# Altium footprint library IC.PcbLib: 204 footprints (part 12 of 13)
Each footprint in its own frame and in the unit in brackets; x right, y up, seen from the top. Pads: shape width x height; smd on the part's side, far side on the other; paste and mask are expansions set on the pad; w line width, h text height; cw(c..) or ccw(c..) is an arc to the next point about the centre after c.
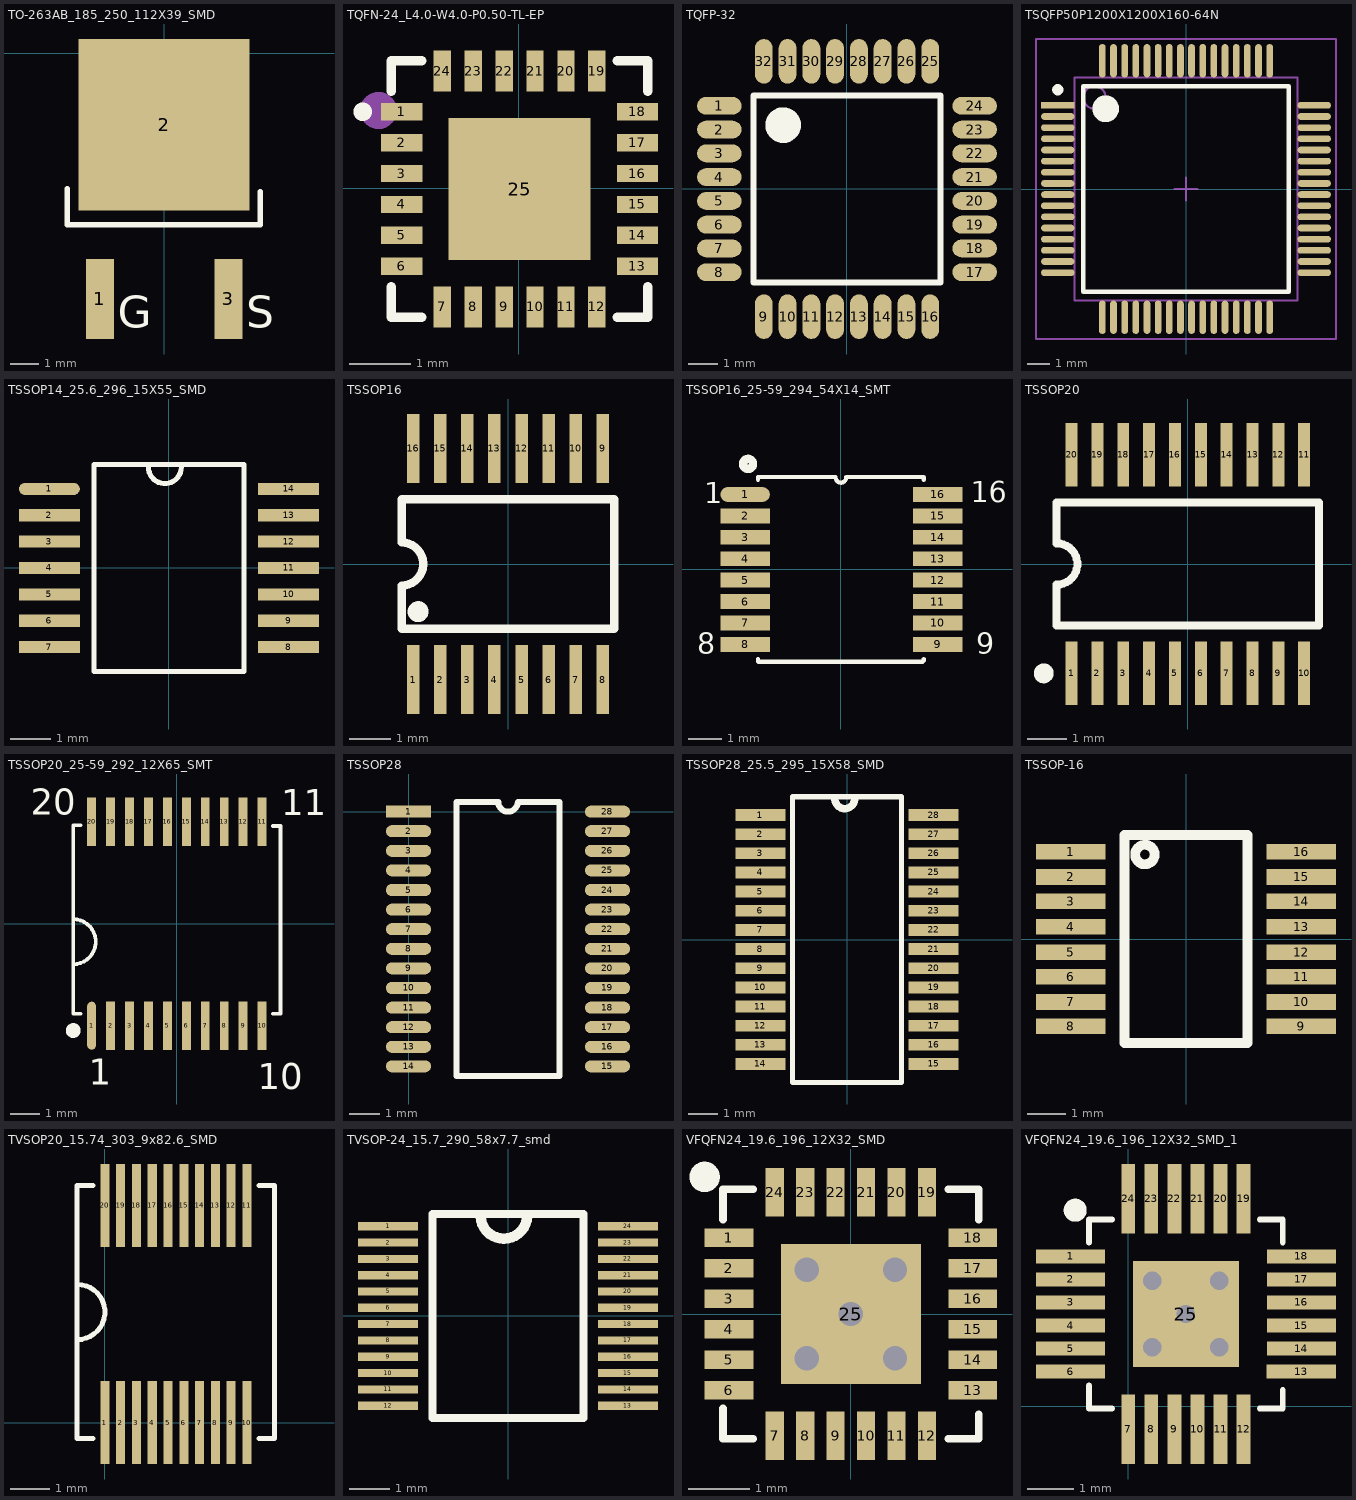
[diagram p11: the footprints below, top view; thin cyan lines are the x and y axes]

## TO-263AB_185_250_112X39_SMD [mm] "CASE: TO-263"
height 4.6
pads (3):
  rect 1x2.85 smd: 1(-2.29,-8.75) 3(2.29,-8.75)
  rect 6.096x6.1 smd: 2(0,-2.54)
Top Overlay:
  lines w0.2: -3.454,-4.826 -3.454,-6.1 3.429,-6.1 3.429,-4.928
  text "G" at -1.651,-9.779 h1.14
  text "S" at 2.921,-9.779 h1.14
3D body "User Library-TO252AA.step": height 2.3, standoff -0.01, extent -3.302,-9.295 3.278,0.405

## TQFN-24_L4.0-W4.0-P0.50-TL-EP [mm]
pads (25):
  rect 0.665x0.28 smd: 1(-1.895,1.236) 2(-1.895,0.736) 3(-1.895,0.236) 4(-1.895,-0.264) 5(-1.895,-0.764) 6(-1.895,-1.264) 13(1.92,-1.264) 14(1.92,-0.764) 15(1.92,-0.264) 16(1.92,0.236) 17(1.92,0.736) 18(1.92,1.236)
  rect 0.28x0.665 smd: 7(-1.238,-1.922) 8(-0.738,-1.922) 9(-0.238,-1.922) 10(0.262,-1.922) 11(0.762,-1.922) 12(1.262,-1.922) 19(1.262,1.893) 20(0.762,1.893) 21(0.262,1.893) 22(-0.238,1.893) 23(-0.738,1.893) 24(-1.238,1.893)
  rect 2.3x2.3 smd: 25(0.012,-0.014)
Top Overlay:
  circle w0.15: c-2.528,1.236 r0.075
  lines w0.152: -2.064,-1.595 -2.064,-2.09 -1.568,-2.09 ; -2.064,1.566 -2.064,2.062 -1.568,2.062 ; 1.593,-2.09 2.088,-2.09 2.088,-1.595 ; 1.593,2.062 2.088,2.062 2.088,1.566
Mechanical 15:
  circle w0.3: c-2.274,1.256 r0.15
3D body "User Library-QFN24_4x4-1.STEP": height 0.75, standoff 0, extent -1.976,-2.021 2.026,1.981

## TQFP-32 [mm] "TQFP, 32-Leads, Body 7.10x7.10mm, Pitch 0.80mm, IPC Medium Density"
height 1.2
pads (32):
  oval 1.5x0.6 smd mask+0.076: 1(-4.3,2.8) 2(-4.3,2) 3(-4.3,1.2) 4(-4.3,0.4) 5(-4.3,-0.4) 6(-4.3,-1.2) 7(-4.3,-2) 8(-4.3,-2.8) 17(4.3,-2.8) 18(4.3,-2) 19(4.3,-1.2) 20(4.3,-0.4) 21(4.3,0.4) 22(4.3,1.2) 23(4.3,2) 24(4.3,2.8)
  oval 0.6x1.5 smd mask+0.076: 9(-2.8,-4.3) 10(-2,-4.3) 11(-1.2,-4.3) 12(-0.4,-4.3) 13(0.4,-4.3) 14(1.2,-4.3) 15(2,-4.3) 16(2.8,-4.3) 25(2.8,4.3) 26(2,4.3) 27(1.2,4.3) 28(0.4,4.3) 29(-0.4,4.3) 30(-1.2,4.3) 31(-2,4.3) 32(-2.8,4.3)
Top Overlay:
  circle w0.6: c-2.15,2.15 r0.3
  lines w0.2: -3.15,-3.15 3.15,-3.15 3.15,3.15 -3.15,3.15 -3.15,-3.15
3D body "TQFP80P925X925X120-32N.step": height 1.2, standoff 0, extent -4.625,-4.625 4.625,4.625

## TSQFP50P1200X1200X160-64N [mm] "TSQFP, 64-Leads, Body 10.00x10.00mm, Pitch 0.50mm, IPC Medium Density"
height 1.6
pads (64):
  rect 1.5x0.3 smd: 1(-5.75,3.75)
  oval 1.5x0.3 smd: 2(-5.75,3.25) 3(-5.75,2.75) 4(-5.75,2.25) 5(-5.75,1.75) 6(-5.75,1.25) 7(-5.75,0.75) 8(-5.75,0.25) 9(-5.75,-0.25) 10(-5.75,-0.75) 11(-5.75,-1.25) 12(-5.75,-1.75) 13(-5.75,-2.25) 14(-5.75,-2.75) 15(-5.75,-3.25) 16(-5.75,-3.75) 33(5.75,-3.75) 34(5.75,-3.25) 35(5.75,-2.75) 36(5.75,-2.25) 37(5.75,-1.75) 38(5.75,-1.25) 39(5.75,-0.75) 40(5.75,-0.25) 41(5.75,0.25) 42(5.75,0.75) 43(5.75,1.25) 44(5.75,1.75) 45(5.75,2.25) 46(5.75,2.75) 47(5.75,3.25) 48(5.75,3.75)
  oval 0.3x1.5 smd: 17(-3.75,-5.75) 18(-3.25,-5.75) 19(-2.75,-5.75) 20(-2.25,-5.75) 21(-1.75,-5.75) 22(-1.25,-5.75) 23(-0.75,-5.75) 24(-0.25,-5.75) 25(0.25,-5.75) 26(0.75,-5.75) 27(1.25,-5.75) 28(1.75,-5.75) 29(2.25,-5.75) 30(2.75,-5.75) 31(3.25,-5.75) 32(3.75,-5.75) 49(3.75,5.75) 50(3.25,5.75) 51(2.75,5.75) 52(2.25,5.75) 53(1.75,5.75) 54(1.25,5.75) 55(0.75,5.75) 56(0.25,5.75) 57(-0.25,5.75) 58(-0.75,5.75) 59(-1.25,5.75) 60(-1.75,5.75) 61(-2.25,5.75) 62(-2.75,5.75) 63(-3.25,5.75) 64(-3.75,5.75)
Top Overlay:
  circle w0.25: c-5.75,4.45 r0.125
  circle w0.6: c-3.6,3.6 r0.3
  lines w0.2: -4.6,-4.6 -4.6,4.6 4.6,4.6 4.6,-4.6 -4.6,-4.6
Top Assembly:
  circle w0.1: c-4.1,4.1 r0.5
  lines w0.1: -5,-5 -5,5 5,5 5,-5 -5,-5
Mechanical 15:
  lines w0.1: -0.5,0 0.5,0 ; 0,-0.5 0,0.5 ; -6.725,-6.725 -6.725,6.725 6.725,6.725 6.725,-6.725 -6.725,-6.725
3D body "TSQFP50P1200X1200X160-64N.step": height 1.6, standoff 0, extent -6,-6 6,6

## TSSOP14_25.6_296_15X55_SMD [mm] "CASE: TSSOP"
height 2
pads (14):
  oval 1.5x0.3 smd: 1(-2.95,1.95)
  rect 1.5x0.3 smd: 2(-2.95,1.3) 3(-2.95,0.65) 4(-2.95,0) 5(-2.95,-0.65) 6(-2.95,-1.3) 7(-2.95,-1.95) 8(2.95,-1.95) 9(2.95,-1.3) 10(2.95,-0.65) 11(2.95,0) 12(2.95,0.65) 13(2.95,1.3) 14(2.95,1.95)
Top Overlay:
  lines w0.127: -0.509,2.489 ccw(c-0.102,2.489) 0.306,2.489 ; -1.85,-2.55 -1.85,2.55 1.85,2.55 1.85,-2.55 -1.85,-2.55
3D body "TSSOP-14.STEP": height 1.2, standoff 0, extent -3.2,-2.5 3.2,2.5

## TSSOP16 [mm] "Shrink Small Outline; 16 Leads; Body Width 4.4 mm; Pitch 0.65 mm"
height 1.1
pads (16):
  rect 0.3x1.65 smd: 1(-2.275,-2.775) 2(-1.625,-2.775) 3(-0.975,-2.775) 4(-0.325,-2.775) 5(0.325,-2.775) 6(0.975,-2.775) 7(1.625,-2.775) 8(2.275,-2.775) 9(2.275,2.775) 10(1.625,2.775) 11(0.975,2.775) 12(0.325,2.775) 13(-0.325,2.775) 14(-0.975,2.775) 15(-1.625,2.775) 16(-2.275,2.775)
Top Overlay:
  circle w0.25: c-2.157,-1.143 r0.125
  lines w0.2: -2.55,-1.55 -2.55,-0.517 ccw(c-2.55,0) -2.55,0.517 -2.55,1.55 2.55,1.55 2.55,-1.55 -2.55,-1.55

## TSSOP16_25-59_294_54X14_SMT [mm] "TSOP, 16-Leads, Body 5.00x4.40mm, Pitch 0.65mm"
height 1.2
pads (16):
  oval 1.5x0.45 smd mask+0.076: 1(-2.908,2.273)
  rect 1.5x0.45 smd mask+0.076: 2(-2.908,1.623) 3(-2.908,0.973) 4(-2.908,0.323) 5(-2.908,-0.327) 6(-2.908,-0.977) 7(-2.908,-1.627) 8(-2.908,-2.277) 9(2.942,-2.277) 10(2.942,-1.627) 11(2.942,-0.977) 12(2.942,-0.327) 13(2.942,0.323) 14(2.942,0.973) 15(2.942,1.623) 16(2.942,2.273)
Top Overlay:
  circle w0.254: c-2.819,3.2 r0.152
  lines w0.127: -2.515,-2.718 -2.515,-2.794 -2.502,-2.807 2.477,-2.807 2.515,-2.769 2.515,-2.718 ; -2.515,2.718 -2.515,2.794 ; -2.515,2.807 -0.164,2.807 ; -0.162,2.796 ccw(c0,2.794) 0.163,2.794 ; 0.164,2.807 2.502,2.807 2.515,2.794 2.515,2.718
  text "1" at -4.152,2.011 h0.64
  text "16" at 3.937,2.032 h0.64
  text "9" at 4.103,-2.561 h0.64
  text "8" at -4.369,-2.565 h0.64
3D body "TSSOP-16 5_1x4_4.STEP": height 1.2, standoff 0.1, extent -3.2,-2.55 3.2,2.55

## TSSOP20 [mm] "Shrink Small Outline; 20 Leads; Body Width 4.4 mm; Pitch 0.65 mm"
height 1.1
pads (20):
  rect 0.3x1.6 smd: 1(-2.925,-2.75) 2(-2.275,-2.75) 3(-1.625,-2.75) 4(-0.975,-2.75) 5(-0.325,-2.75) 6(0.325,-2.75) 7(0.975,-2.75) 8(1.625,-2.75) 9(2.275,-2.75) 10(2.925,-2.75) 11(2.925,2.75) 12(2.275,2.75) 13(1.625,2.75) 14(0.975,2.75) 15(0.325,2.75) 16(-0.325,2.75) 17(-0.975,2.75) 18(-1.625,2.75) 19(-2.275,2.75) 20(-2.925,2.75)
Top Overlay:
  circle w0.25: c-3.625,-2.75 r0.125
  lines w0.2: -3.3,-1.55 -3.3,-0.52 ccw(c-3.3,0) -3.3,0.52 -3.3,1.55 3.3,1.55 3.3,-1.55 -3.3,-1.55
3D body "tssop-20.step": height 1.12, standoff -0.08, extent -3.3,-3.3 3.3,3.3

## TSSOP20_25-59_292_12X65_SMT [mil]
pads (20):
  oval 12x65 smd mask+3: 1(-115.16,-137.8)
  rect 12x65 smd mask+3: 2(-89.56,-137.8) 3(-63.97,-137.8) 4(-38.38,-137.8) 5(-12.8,-137.8) 6(12.8,-137.8) 7(38.38,-137.8) 8(63.98,-137.8) 9(89.56,-137.8) 10(115.16,-137.8) 11(115.16,137.8) 12(89.56,137.8) 13(63.98,137.8) 14(38.38,137.8) 15(12.8,137.8) 16(-12.8,137.8) 17(-38.38,137.8) 18(-63.97,137.8) 19(-89.56,137.8) 20(-115.16,137.8)
Top Overlay:
  circle w10: c-140,-144.3 r5
  lines w5: -140,-54.71 ccw(c-140,-24.3) -140,6.12 ; -130.01,-121.8 -140,-121.8 -140,132.88 -130,132.88 ; 130,-121.8 140,-121.8 140,132.14 130.01,132.14
  text "20" at -197.45,147.05 h35
  text "11" at 141.23,146.45 h35
  text "10" at 109,-223.3 h35
  text "1" at -119,-217.3 h35
3D body "TSSOP-20.STEP": height 47.24, standoff 0, extent -130,-129.76 129.84,128.11

## TSSOP28 [mm]
pads (28):
  rect 1.5x0.4 smd: 1(0,0)
  oval 1.5x0.4 smd: 2(0,-0.65) 3(0,-1.3) 4(0,-1.95) 5(0,-2.6) 6(0,-3.25) 7(0,-3.9) 8(0,-4.55) 9(0,-5.2) 10(0,-5.85) 11(0,-6.5) 12(0,-7.15) 13(0,-7.8) 14(0,-8.45) 15(6.6,-8.45) 16(6.6,-7.8) 17(6.6,-7.15) 18(6.6,-6.5) 19(6.6,-5.85) 20(6.6,-5.2) 21(6.6,-4.55) 22(6.6,-3.9) 23(6.6,-3.25) 24(6.6,-2.6) 25(6.6,-1.95) 26(6.6,-1.3) 27(6.6,-0.65) 28(6.6,0)
Top Overlay:
  lines w0.2: 1.585,0.325 1.585,-8.775 5.015,-8.775 5.015,0.325 3.625,0.325 cw(c3.3,0.325) 2.975,0.325 ; 1.593,0.325 2.983,0.325
3D body "TSSOP-28_P065.STEP": height 0.95, standoff -0.03, extent 0.102,-9.065 6.502,0.635

## TSSOP28_25.5_295_15X58_SMD [mm] "CASE: TSSOP"
height 1.1
pads (28):
  rect 1.7x0.4 smd mask+0.076: 1(-2.938,4.225) 2(-2.938,3.575) 3(-2.938,2.925) 4(-2.938,2.275) 5(-2.938,1.625) 6(-2.938,0.975) 7(-2.938,0.325) 8(-2.938,-0.325) 9(-2.938,-0.975) 10(-2.938,-1.625) 11(-2.938,-2.275) 12(-2.938,-2.925) 13(-2.938,-3.575) 14(-2.938,-4.225) 15(2.938,-4.225) 16(2.938,-3.575) 17(2.938,-2.925) 18(2.938,-2.275) 19(2.938,-1.625) 20(2.938,-0.975) 21(2.938,-0.325) 22(2.938,0.325) 23(2.938,0.975) 24(2.938,1.625) 25(2.938,2.275) 26(2.938,2.925) 27(2.938,3.575) 28(2.938,4.225)
Top Overlay:
  lines w0.178: -1.85,-4.85 -1.85,4.85 1.85,4.85 1.85,-4.85 -1.85,-4.85
  lines w0.254: -0.409,4.745 ccw(c-0.076,4.775) 0.257,4.796
3D body "PCA9685PW,112.stp": height 1.1, standoff 0, extent -3.2,-4.85 3.2,4.85

## TSSOP-16 [mil]
height 43.31
pads (16):
  rect 71x16 smd: 1(-118.11,89.5) 2(-118.11,63.5) 3(-118.11,38.5) 4(-118.11,12.5) 5(-118.11,-13.5) 6(-118.11,-38.5) 7(-118.11,-64.5) 8(-118.11,-89.5) 9(118.11,-89.5) 10(118.11,-64.5) 11(118.11,-38.5) 12(118.11,-13.5) 13(118.11,12.5) 14(118.11,38.5) 15(118.11,63.5) 16(118.11,89.5)
Top Overlay:
  circle w10: c-42,86.5 r10
  lines w10: -62.99,106.1 -62.99,-106.5 62.99,-106.5 62.99,106.1 ; -62.99,106.5 62.99,106.5
3D body "TSSOP-16.stp": height 43.67, standoff 0.39, extent -126.58,-100.4 126.59,100.4

## TVSOP20_15.74_303_9x82.6_SMD [mm] "TVSOP Package"
height 1.2
pads (20):
  rect 0.23x2.1 smd mask+0.076: 1(0,0) 2(0.4,0) 3(0.8,0) 4(1.2,0) 5(1.6,0) 6(2,0) 7(2.4,0) 8(2.8,0) 9(3.2,0) 10(3.6,0) 11(3.6,5.5) 12(3.2,5.5) 13(2.8,5.5) 14(2.4,5.5) 15(2,5.5) 16(1.6,5.5) 17(1.2,5.5) 18(0.8,5.5) 19(0.4,5.5) 20(0,5.5)
Top Overlay:
  lines w0.127: -0.7,2.1 ccw(c-0.7,2.8) -0.7,3.5 ; -0.3,-0.4 -0.7,-0.4 -0.7,5.1 -0.7,6 ; -0.3,6 -0.7,6 ; 3.9,6 4.3,6 ; -0.7,6 -0.7,6 ; 3.9,-0.4 4.3,-0.4 4.3,6 ; 3.9,-0.4 3.9,-0.4 ; 4.3,6 4.3,6
3D body "SN74CB3Q3245DGVR.stp": height 1.2, standoff 0, extent -0.7,-0.4 4.3,6

## TVSOP-24_15.7_290_58x7.7_smd [mm] "IC TRNSLTR BIDIRECTIONAL 24TVSOP"
height 1.2
pads (24):
  rect 1.475x0.2 smd: 1(-2.938,2.2) 2(-2.938,1.8) 3(-2.938,1.4) 4(-2.938,1) 5(-2.938,0.6) 6(-2.938,0.2) 7(-2.938,-0.2) 8(-2.938,-0.6) 9(-2.938,-1) 10(-2.938,-1.4) 11(-2.938,-1.8) 12(-2.938,-2.2) 13(2.938,-2.2) 14(2.938,-1.8) 15(2.938,-1.4) 16(2.938,-1) 17(2.938,-0.6) 18(2.938,-0.2) 19(2.938,0.2) 20(2.938,0.6) 21(2.938,1) 22(2.938,1.4) 23(2.938,1.8) 24(2.938,2.2)
Top Overlay:
  lines w0.2: -1.85,-2.5 -1.85,2.5 1.85,2.5 1.85,-2.5 -1.85,-2.5
  lines w0.254: -0.672,2.439 ccw(c-0.102,2.464) 0.469,2.441
3D body "SN74LVC8T245DGVR.stp": height 1.2, standoff 0, extent -3.2,-2.5 3.2,2.5

## VFQFN24_19.6_196_12X32_SMD [mm] "CASE: VQFN24"
height 1
pads (25):
  rect 0.8x0.3 smd mask+0.076: 1(-2,1.25) 2(-2,0.75) 3(-2,0.25) 4(-2,-0.25) 5(-2,-0.75) 6(-2,-1.25) 13(2,-1.25) 14(2,-0.75) 15(2,-0.25) 16(2,0.25) 17(2,0.75) 18(2,1.25)
  rect 0.3x0.8 smd mask+0.076: 7(-1.25,-2) 8(-0.75,-2) 9(-0.25,-2) 10(0.25,-2) 11(0.75,-2) 12(1.25,-2) 19(1.25,2) 20(0.75,2) 21(0.25,2) 22(-0.25,2) 23(-0.75,2) 24(-1.25,2)
  rect 2.3x2.3 smd mask+0.076: 25(0,0)
via 0.725,-0.725 diameter 0.8 hole 0.4
via -0.725,-0.725 diameter 0.8 hole 0.4
via -0.725,0.725 diameter 0.8 hole 0.4
via 0.725,0.725 diameter 0.8 hole 0.4
via 0,0 diameter 0.8 hole 0.4
Top Overlay:
  lines w0.127: -2.1,-1.55 -2.1,-2.05 -1.6,-2.05 ; -2.1,1.55 -2.1,2.05 -1.7,2.05 -1.6,2.05 ; 1.6,-2.05 2.1,-2.05 2.1,-1.65 ; 1.6,2.05 2.1,2.05 2.1,1.55
  lines w0.25: -2.283,2.294 ccw(c-2.4,2.25) -2.275,2.25
3D body "DRV8701PRGET.stp": height 1, standoff 0, extent -2.05,-2.05 2.05,2.05

## VFQFN24_19.6_196_12X32_SMD_1 [mm] "CASE: VQFN24"
height 1
pads (25):
  rect 1.5x0.3 smd mask+0.076: 1(-1.25,3.25) 2(-1.25,2.75) 3(-1.25,2.25) 4(-1.25,1.75) 5(-1.25,1.25) 6(-1.25,0.75) 13(3.75,0.75) 14(3.754,1.25) 15(3.754,1.75) 16(3.754,2.25) 17(3.754,2.75) 18(3.754,3.25)
  rect 0.3x1.5 smd mask+0.076: 7(0,-0.5) 8(0.5,-0.5) 9(1,-0.5) 10(1.5,-0.5) 11(2,-0.5) 12(2.5,-0.5) 19(2.5,4.5) 20(2,4.5) 21(1.5,4.5) 22(1,4.5) 23(0.5,4.5) 24(0,4.5)
  rect 2.3x2.3 smd mask+0.076: 25(1.25,2)
via 1.975,1.275 diameter 0.8 hole 0.4
via 0.525,1.275 diameter 0.8 hole 0.4
via 0.525,2.725 diameter 0.8 hole 0.4
via 1.975,2.725 diameter 0.8 hole 0.4
via 1.25,2 diameter 0.8 hole 0.4
Top Overlay:
  lines w0.127: -0.85,0.45 -0.85,-0.05 -0.35,-0.05 ; -0.85,3.55 -0.85,4.05 -0.45,4.05 -0.35,4.05 ; 2.85,-0.05 3.35,-0.05 3.35,0.35 ; 2.85,4.05 3.35,4.05 3.35,3.55
  lines w0.25: -1.033,4.294 ccw(c-1.15,4.25) -1.025,4.25
3D body "DRV8701PRGET.stp": height 1, standoff 0, extent -0.8,-0.05 3.3,4.05